# Altium schematic symbol library CSRT0603FT5R00.SchLib: 1 symbol
Pins are listed as number, name and electrical type; pins without a type are passive.

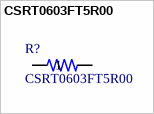
[diagram p0: symbol CSRT0603FT5R00]

## CSRT0603FT5R00
designator R?
5 Ohms ±1% 0.4W Chip Resistor 0603 (1608 Metric) Automotive AEC-Q200, Current Sense Thin Film; Manufacturer_Name: Stackpole International; Type: Chip Resistor - Surface Mount; Copyright: Copyright (C) 2025 Ultra Librarian. All rights reserved.; Manufacturer_Part_Number: CSRT0603FT5R00
footprint RES_CSRT0603_STP
pins: 1, 2